# EAGLE library part ARDUINO-TRANSISTORS_2N7002DW-7-F (library HA_FONA_LARA_20)
MOSFET 2N-CH 60V 0.23A SOT-363
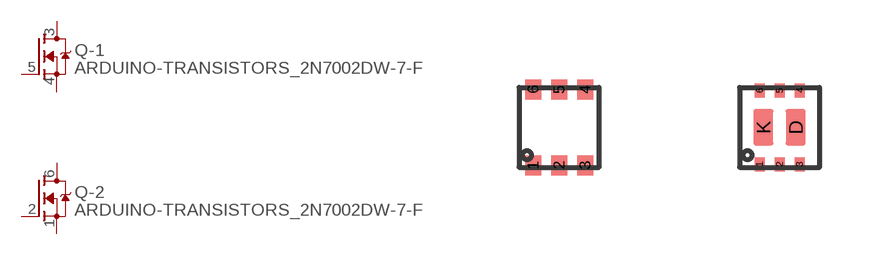
[diagram p2: symbol with the pads of ARDUINO-TRANSISTORS_PWR_SC70-6L2; footprints ARDUINO-TRANSISTORS_PWR_SC70-6L2, ARDUINO-TRANSISTORS_PWR_SC70-6L]

Designator prefix Q; gates -1=ARDUINO-TRANSISTORS_MOSFET_N-CHN -2=ARDUINO-TRANSISTORS_MOSFET_N-CHN

## ARDUINO-TRANSISTORS_2N7002DW-7-FNO_PAD (DATASHEET: http://www.diodes.com/_files/datasheets/ds30120.pdf; DISTRIBUTOR-LINK: http://www.digikey.com/product-detail/en/diodes-incorporated/2N7002DW-7-F/2N7002DW-FDITR-ND/749948; DISTRIBUTOR-PN: 2N7002DW-FDITR-ND; MANUFACTURER: Diodes Incorporated; MANUFACTURER-PN: 2N7002DW-7-F), ARDUINO-TRANSISTORS_2N7002DW-7-FDNPNO_PAD (DATASHEET: DNP; DISTRIBUTOR-LINK: DNP; DISTRIBUTOR-PN: DNP; MANUFACTURER: DNP; MANUFACTURER-PN: DNP)  [ARDUINO-TRANSISTORS_PWR_SC70-6L2]
1  -2:S  pas
2  -2:G  pas
3  -1:D  pas
4  -1:S  pas
5  -1:G  pas
6  -2:D  pas

## ARDUINO-TRANSISTORS_2N7002DW-7-FPAD (DATASHEET: https://www.diodes.com/assets/Datasheets/ds30120.pdf; DISTRIBUTOR-LINK: http://www.digikey.com/product-detail/en/diodes-incorporated/2N7002DW-7-F/2N7002DW-FDICT-ND/750003; DISTRIBUTOR-PN: 2N7002DW-FDICT-ND; MANUFACTURER: Diodes Incorporated; MANUFACTURER-PN: 2N7002DW-7-F; VALUE: 2N7002)  [ARDUINO-TRANSISTORS_PWR_SC70-6L]
1  -1:S  pas
2  -1:G  pas
3  -1:D  pas
4  -2:S  pas
5  -2:G  pas
6  -2:D  pas
D  -1:D  pas
K  -2:D  pas

## Footprint ARDUINO-TRANSISTORS_PWR_SC70-6L2 (pad centres in mm)
smd 0.4 x 0.5: 1 -0.65,-0.95; 2 0,-0.95; 3 0.65,-0.95; 4 0.65,0.95; 5 0,0.95; 6 -0.65,0.95

## Footprint ARDUINO-TRANSISTORS_PWR_SC70-6L (pad centres in mm)
smd 0.25 x 0.35: 1 -0.5,-0.925; 2 0,-0.925; 3 0.5,-0.925; 4 0.5,0.925; 5 0,0.925; 6 -0.5,0.925
smd 0.5 x 0.9: D 0.405,0; K -0.405,0